# Altium footprint library WR-PHD_Pin Header_2.00mm.PcbLib: 63 footprints (part 4 of 4)
Each footprint in its own frame and in the unit in brackets; x right, y up, seen from the top. Pads: shape width x height; smd on the part's side, far side on the other; paste and mask are expansions set on the pad; w line width, h text height; cw(c..) or ccw(c..) is an arc to the next point about the centre after c.
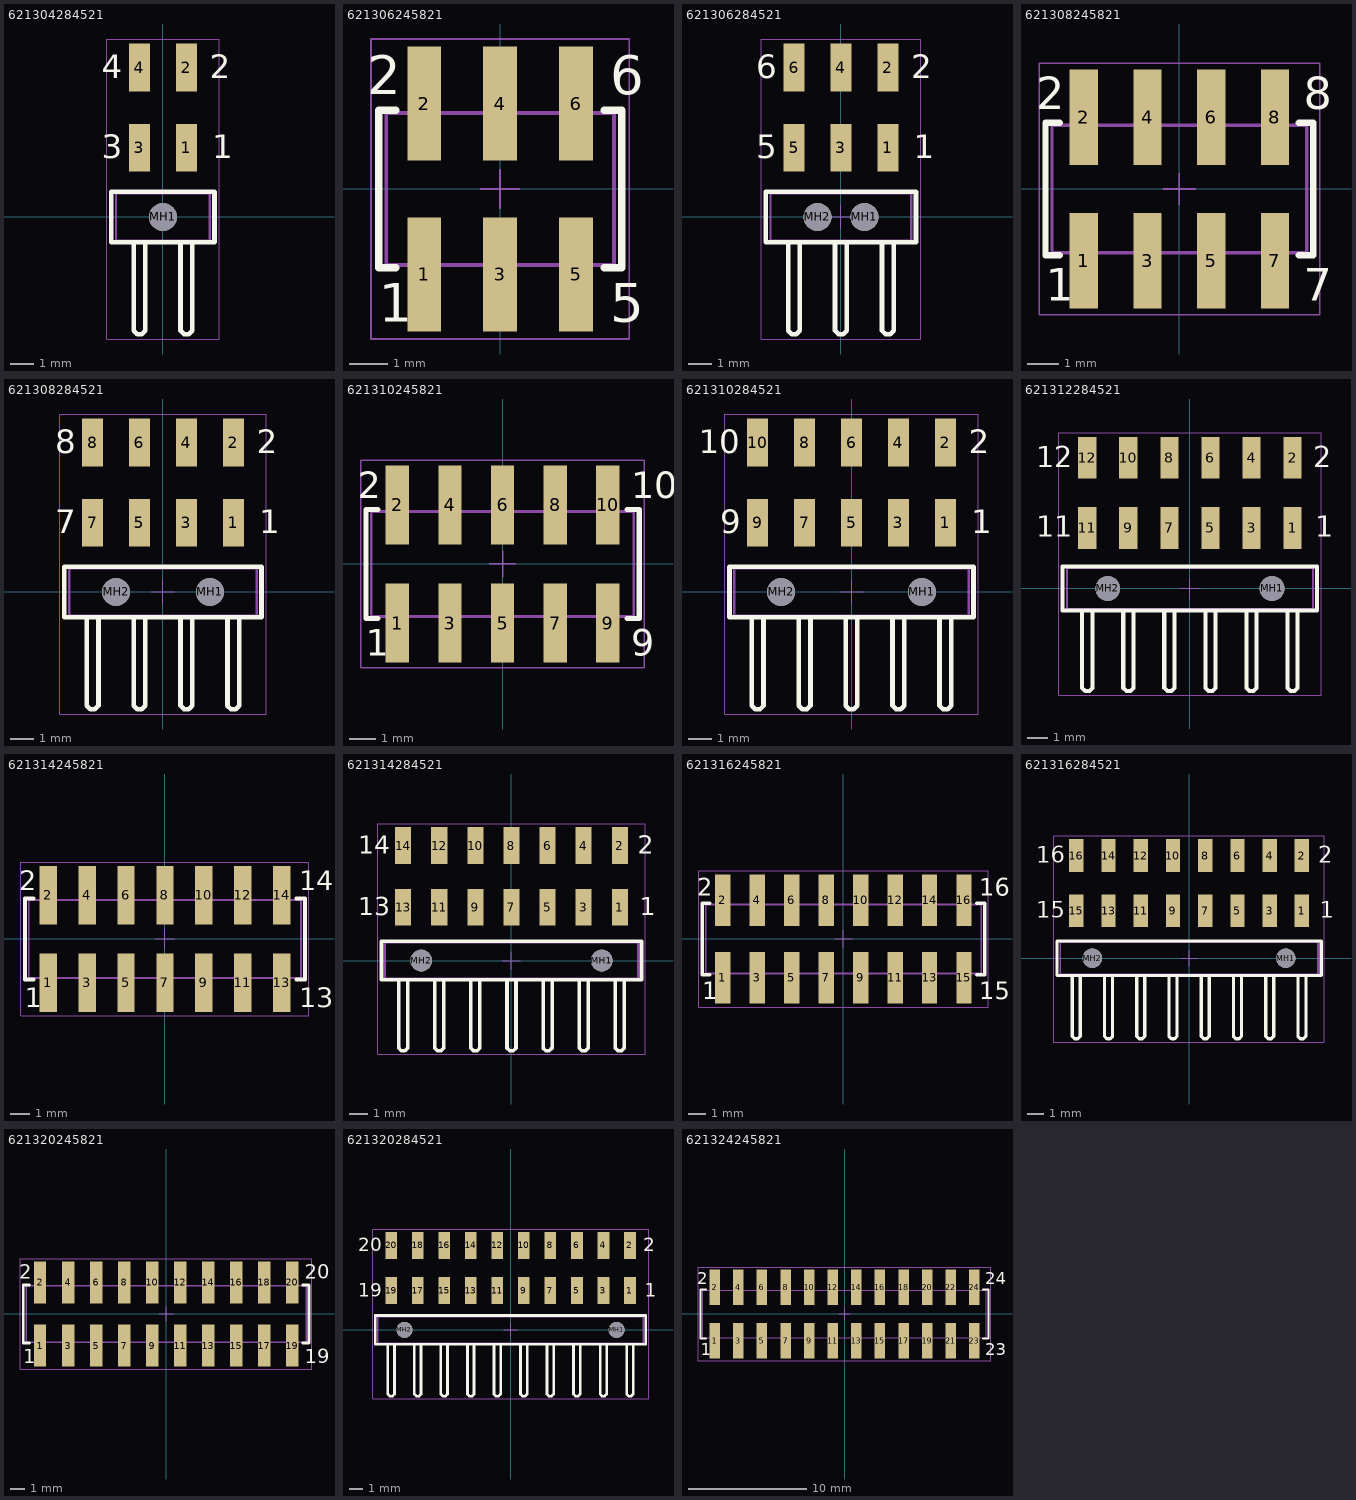
[diagram p3: the footprints below, top view; thin cyan lines are the x and y axes]

## 621304284521 [mm] "Pin Header, pitch 2.00 mm, SMD, Angled, dual row, 4p"
height 5.5
pads (5):
  rect 0.89x2.03 smd: 1(1,2.95) 2(1,6.37) 3(-1,2.95) 4(-1,6.37)
  round 1.2 hole 1.2 unplated: MH1(0,0)
Top Overlay:
  lines w0.2: -1.25,-1.075 -1.25,-4.5 -1.25,-4.75 -1.25,-4.85 -1.1,-5 -0.9,-5 -0.75,-4.85 -0.75,-4.75 -0.75,-4.5 -0.75,-1.075 ; 0.75,-1.075 0.75,-4.5 0.75,-4.75 0.75,-4.85 0.9,-5 1.1,-5 1.25,-4.85 1.25,-4.75 1.25,-4.5 1.25,-1.075 ; -2.2,-1.075 2.2,-1.075 2.2,1.075 -2.2,1.075 -2.2,-1.075
  text "4" at -2.6,5.91 h1.02
  text "2" at 2,5.91 h1.02
  text "3" at -2.6,2.51 h1.02
  text "1" at 2.1,2.51 h1.02
Mechanical 13:
  lines w0.1: -1.25,-1 -1.25,-4.5 -1.25,-4.75 -1.25,-4.85 -1.1,-5 -0.9,-5 -0.75,-4.85 -0.75,-4.75 -0.75,-4.5 -0.75,-1 ; 0.75,-1 0.75,-4.5 0.75,-4.75 0.75,-4.85 0.9,-5 1.1,-5 1.25,-4.85 1.25,-4.75 1.25,-4.5 1.25,-1 ; -2,-1 2,-1 2,1 -2,1 -2,-1
Mechanical 15:
  lines w0.05: -0.5,0 0.5,0 ; 0,-0.5 0,0.5 ; -2.4,-5.2 -2.4,7.585 2.4,7.585 2.4,-5.2 -2.4,-5.2
3D body "621304284521.stp": height 4.02, standoff -0.98, extent -2,-5 2,7.22

## 621306245821 [mm] "2.00 mm SMT Dual Pin Header Low Profile (Reel), 6p"
height 4.7
pads (6):
  rect 0.89x3 smd: 1(-2,-2.25) 2(-2,2.25) 3(0,-2.25) 4(0,2.25) 5(2,-2.25) 6(2,2.25)
Top Overlay:
  lines w0.2: -2.75,-2.075 -3.2,-2.075 -3.2,2.075 -2.75,2.075 ; 2.75,-2.075 3.2,-2.075 3.2,2.075 2.75,2.075
  text "6" at 2.9,2.5 h1.02
  text "5" at 2.9,-3.5 h1.02
  text "2" at -3.5,2.5 h1.02
  text "1" at -3.2,-3.5 h1.02
Mechanical 13:
  lines w0.1: -2.25,-2 -2.25,-3.1 -1.75,-3.1 -1.75,-2 ; -2.25,2 -2.25,3.1 -1.75,3.1 -1.75,2 ; -0.25,-2 -0.25,-3.1 0.25,-3.1 0.25,-2 ; -0.25,2 -0.25,3.1 0.25,3.1 0.25,2 ; 1.75,-2 1.75,-3.1 2.25,-3.1 2.25,-2 ; 1.75,2 1.75,3.1 2.25,3.1 2.25,2 ; -3,-2 -3,2 3,2 3,-2 -3,-2
Mechanical 15:
  lines w0.05: -0.5,0 0.5,0 ; 0,-0.5 0,0.5 ; -3.4,-3.95 -3.4,3.95 3.4,3.95 3.4,-3.95 -3.4,-3.95
3D body "621306245821.stp": height 4.7, standoff 0, extent -3,-3.1 3,3.1

## 621306284521 [mm] "Pin Header, pitch 2.00 mm, SMD, Angled, dual row, 6p"
height 5.5
pads (8):
  rect 0.89x2.03 smd: 1(2,2.95) 2(2,6.37) 3(0,2.95) 4(0,6.37) 5(-2,2.95) 6(-2,6.37)
  round 1.2 hole 1.2 unplated: MH1(1,0) MH2(-1,0)
Top Overlay:
  lines w0.2: -2.25,-1.075 -2.25,-4.5 -2.25,-4.75 -2.25,-4.85 -2.1,-5 -1.9,-5 -1.75,-4.85 -1.75,-4.75 -1.75,-4.5 -1.75,-1.075 ; -0.25,-1.075 -0.25,-4.5 -0.25,-4.75 -0.25,-4.85 -0.1,-5 0.1,-5 0.25,-4.85 0.25,-4.75 0.25,-4.5 0.25,-1.075 ; 1.75,-1.075 1.75,-4.5 1.75,-4.75 1.75,-4.85 1.9,-5 2.1,-5 2.25,-4.85 2.25,-4.75 2.25,-4.5 2.25,-1.075 ; -3.2,-1.075 3.2,-1.075 3.2,1.075 -3.2,1.075 -3.2,-1.075
  text "2" at 3,5.91 h1.02
  text "1" at 3.1,2.51 h1.02
  text "6" at -3.6,5.91 h1.02
  text "5" at -3.6,2.51 h1.02
Mechanical 13:
  lines w0.1: -2.25,-1 -2.25,-4.5 -2.25,-4.75 -2.25,-4.85 -2.1,-5 -1.9,-5 -1.75,-4.85 -1.75,-4.75 -1.75,-4.5 -1.75,-1 ; -0.25,-1 -0.25,-4.5 -0.25,-4.75 -0.25,-4.85 -0.1,-5 0.1,-5 0.25,-4.85 0.25,-4.75 0.25,-4.5 0.25,-1 ; 1.75,-1 1.75,-4.5 1.75,-4.75 1.75,-4.85 1.9,-5 2.1,-5 2.25,-4.85 2.25,-4.75 2.25,-4.5 2.25,-1 ; -3,-1 3,-1 3,1 -3,1 -3,-1
Mechanical 15:
  lines w0.05: -0.5,0 0.5,0 ; 0,-0.5 0,0.5 ; -3.4,-5.2 -3.4,7.585 3.4,7.585 3.4,-5.2 -3.4,-5.2
3D body "621306284521.stp": height 4.02, standoff -0.98, extent -3,-5 3,7.22

## 621308245821 [mm] "2.00 mm SMT Dual Pin Header Low Profile (Reel), 8p"
height 4.7
pads (8):
  rect 0.89x3 smd: 1(-3,-2.25) 2(-3,2.25) 3(-1,-2.25) 4(-1,2.25) 5(1,-2.25) 6(1,2.25) 7(3,-2.25) 8(3,2.25)
Top Overlay:
  lines w0.2: -3.75,-2.075 -4.2,-2.075 -4.2,2.075 -3.75,2.075 ; 3.75,-2.075 4.2,-2.075 4.2,2.075 3.75,2.075
  text "1" at -4.2,-3.5 h1.02
  text "2" at -4.5,2.5 h1.02
  text "7" at 3.9,-3.5 h1.02
  text "8" at 3.9,2.5 h1.02
Mechanical 13:
  lines w0.1: -3.25,-2 -3.25,-3.1 -2.75,-3.1 -2.75,-2 ; -3.25,2 -3.25,3.1 -2.75,3.1 -2.75,2 ; -1.25,-2 -1.25,-3.1 -0.75,-3.1 -0.75,-2 ; -1.25,2 -1.25,3.1 -0.75,3.1 -0.75,2 ; 0.75,-2 0.75,-3.1 1.25,-3.1 1.25,-2 ; 0.75,2 0.75,3.1 1.25,3.1 1.25,2 ; 2.75,-2 2.75,-3.1 3.25,-3.1 3.25,-2 ; 2.75,2 2.75,3.1 3.25,3.1 3.25,2 ; -4,-2 4,-2 4,2 -4,2 -4,-2
Mechanical 15:
  lines w0.05: -0.5,0 0.5,0 ; 0,-0.5 0,0.5 ; -4.4,-3.95 4.4,-3.95 4.4,3.95 -4.4,3.95 -4.4,-3.95
3D body "621308245821.stp": height 4.7, standoff 0, extent -4,-3.1 4,3.1

## 621308284521 [mm] "Pin Header, pitch 2.00 mm, SMD, Angled, dual row, 8p"
height 5.5
pads (10):
  rect 0.89x2.03 smd: 1(3,2.95) 2(3,6.37) 3(1,2.95) 4(1,6.37) 5(-1,2.95) 6(-1,6.37) 7(-3,2.95) 8(-3,6.37)
  round 1.2 hole 1.2 unplated: MH1(2,0) MH2(-2,0)
Top Overlay:
  lines w0.2: -3.25,-1.075 -3.25,-4.5 -3.25,-4.75 -3.25,-4.85 -3.1,-5 -2.9,-5 -2.75,-4.85 -2.75,-4.75 -2.75,-4.5 -2.75,-1.075 ; -1.25,-1.075 -1.25,-4.5 -1.25,-4.75 -1.25,-4.85 -1.1,-5 -0.9,-5 -0.75,-4.85 -0.75,-4.75 -0.75,-4.5 -0.75,-1.075 ; 0.75,-1.075 0.75,-4.5 0.75,-4.75 0.75,-4.85 0.9,-5 1.1,-5 1.25,-4.85 1.25,-4.75 1.25,-4.5 1.25,-1.075 ; 2.75,-1.075 2.75,-4.5 2.75,-4.75 2.75,-4.85 2.9,-5 3.1,-5 3.25,-4.85 3.25,-4.75 3.25,-4.5 3.25,-1.075 ; -4.2,-1.075 -4.2,1.075 4.2,1.075 4.2,-1.075 -4.2,-1.075
  text "1" at 4.1,2.51 h1.02
  text "2" at 4,5.91 h1.02
  text "8" at -4.6,5.91 h1.02
  text "7" at -4.6,2.51 h1.02
Mechanical 13:
  lines w0.1: -3.25,-1 -3.25,-4.5 -3.25,-4.75 -3.25,-4.85 -3.1,-5 -2.9,-5 -2.75,-4.85 -2.75,-4.75 -2.75,-4.5 -2.75,-1 ; -1.25,-1 -1.25,-4.5 -1.25,-4.75 -1.25,-4.85 -1.1,-5 -0.9,-5 -0.75,-4.85 -0.75,-4.75 -0.75,-4.5 -0.75,-1 ; 0.75,-1 0.75,-4.5 0.75,-4.75 0.75,-4.85 0.9,-5 1.1,-5 1.25,-4.85 1.25,-4.75 1.25,-4.5 1.25,-1 ; 2.75,-1 2.75,-4.5 2.75,-4.75 2.75,-4.85 2.9,-5 3.1,-5 3.25,-4.85 3.25,-4.75 3.25,-4.5 3.25,-1 ; -4,-1 -4,1 4,1 4,-1 -4,-1
Mechanical 15:
  lines w0.05: -0.5,0 0.5,0 ; 0,-0.5 0,0.5 ; -4.4,-5.2 4.4,-5.2 4.4,7.585 -4.4,7.585 -4.4,-5.2
3D body "621308284521.stp": height 4.02, standoff -0.98, extent -4,-5 4,7.22

## 621310245821 [mm] "2.00 mm SMT Dual Pin Header Low Profile (Reel), 10p"
height 4.7
pads (10):
  rect 0.89x3 smd: 1(-4,-2.25) 2(-4,2.25) 3(-2,-2.25) 4(-2,2.25) 5(0,-2.25) 6(0,2.25) 7(2,-2.25) 8(2,2.25) 9(4,-2.25) 10(4,2.25)
Top Overlay:
  lines w0.2: -4.75,-2.075 -5.2,-2.075 -5.2,2.075 -4.75,2.075 ; 4.75,-2.075 5.2,-2.075 5.2,2.075 4.75,2.075
  text "2" at -5.5,2.5 h1.02
  text "1" at -5.2,-3.5 h1.02
  text "9" at 4.9,-3.5 h1.02
  text "10" at 4.9,2.5 h1.02
Mechanical 13:
  lines w0.1: -4.25,-2 -4.25,-3.1 -3.75,-3.1 -3.75,-2 ; -4.25,2 -4.25,3.1 -3.75,3.1 -3.75,2 ; -2.25,-2 -2.25,-3.1 -1.75,-3.1 -1.75,-2 ; -2.25,2 -2.25,3.1 -1.75,3.1 -1.75,2 ; -0.25,-2 -0.25,-3.1 0.25,-3.1 0.25,-2 ; -0.25,2 -0.25,3.1 0.25,3.1 0.25,2 ; 1.75,-2 1.75,-3.1 2.25,-3.1 2.25,-2 ; 1.75,2 1.75,3.1 2.25,3.1 2.25,2 ; 3.75,-2 3.75,-3.1 4.25,-3.1 4.25,-2 ; 3.75,2 3.75,3.1 4.25,3.1 4.25,2 ; -5,-2 -5,2 5,2 5,-2 -5,-2
Mechanical 15:
  lines w0.05: -0.5,0 0.5,0 ; 0,-0.5 0,0.5 ; -5.4,-3.95 -5.4,3.95 5.4,3.95 5.4,-3.95 -5.4,-3.95
3D body "621310245821.stp": height 4.7, standoff 0, extent -5,-3.1 5,3.1

## 621310284521 [mm] "Pin Header, pitch 2.00 mm, SMD, Angled, dual row, 10p"
height 5.5
pads (12):
  rect 0.89x2.03 smd: 1(4,2.95) 2(4,6.37) 3(2,2.95) 4(2,6.37) 5(0,2.95) 6(0,6.37) 7(-2,2.95) 8(-2,6.37) 9(-4,2.95) 10(-4,6.37)
  round 1.2 hole 1.2 unplated: MH1(3,0) MH2(-3,0)
Top Overlay:
  lines w0.2: -4.25,-1.075 -4.25,-4.5 -4.25,-4.75 -4.25,-4.85 -4.1,-5 -3.9,-5 -3.75,-4.85 -3.75,-4.75 -3.75,-4.5 -3.75,-1.075 ; -2.25,-1.075 -2.25,-4.5 -2.25,-4.75 -2.25,-4.85 -2.1,-5 -1.9,-5 -1.75,-4.85 -1.75,-4.75 -1.75,-4.5 -1.75,-1.075 ; -0.25,-1.075 -0.25,-4.5 -0.25,-4.75 -0.25,-4.85 -0.1,-5 0.1,-5 0.25,-4.85 0.25,-4.75 0.25,-4.5 0.25,-1.075 ; 1.75,-1.075 1.75,-4.5 1.75,-4.75 1.75,-4.85 1.9,-5 2.1,-5 2.25,-4.85 2.25,-4.75 2.25,-4.5 2.25,-1.075 ; 3.75,-1.075 3.75,-4.5 3.75,-4.75 3.75,-4.85 3.9,-5 4.1,-5 4.25,-4.85 4.25,-4.75 4.25,-4.5 4.25,-1.075 ; -5.2,-1.075 -5.2,1.075 5.2,1.075 5.2,-1.075 -5.2,-1.075
  text "1" at 5.1,2.51 h1.02
  text "2" at 5,5.91 h1.02
  text "10" at -6.5,5.91 h1.02
  text "9" at -5.6,2.51 h1.02
Mechanical 13:
  lines w0.1: -4.25,-1 -4.25,-4.5 -4.25,-4.75 -4.25,-4.85 -4.1,-5 -3.9,-5 -3.75,-4.85 -3.75,-4.75 -3.75,-4.5 -3.75,-1 ; -2.25,-1 -2.25,-4.5 -2.25,-4.75 -2.25,-4.85 -2.1,-5 -1.9,-5 -1.75,-4.85 -1.75,-4.75 -1.75,-4.5 -1.75,-1 ; -0.25,-1 -0.25,-4.5 -0.25,-4.75 -0.25,-4.85 -0.1,-5 0.1,-5 0.25,-4.85 0.25,-4.75 0.25,-4.5 0.25,-1 ; 1.75,-1 1.75,-4.5 1.75,-4.75 1.75,-4.85 1.9,-5 2.1,-5 2.25,-4.85 2.25,-4.75 2.25,-4.5 2.25,-1 ; 3.75,-1 3.75,-4.5 3.75,-4.75 3.75,-4.85 3.9,-5 4.1,-5 4.25,-4.85 4.25,-4.75 4.25,-4.5 4.25,-1 ; -5,-1 -5,1 5,1 5,-1 -5,-1
Mechanical 15:
  lines w0.05: -0.5,0 0.5,0 ; 0,-0.5 0,0.5 ; -5.4,-5.2 5.4,-5.2 5.4,7.585 -5.4,7.585 -5.4,-5.2
3D body "621310284521.stp": height 4.02, standoff -0.98, extent -5,-5 5,7.22

## 621312284521 [mm] "Pin Header, pitch 2.00 mm, SMD, Angled, dual row, 12p"
height 5.5
pads (14):
  rect 0.89x2.03 smd: 1(5,2.95) 2(5,6.37) 3(3,2.95) 4(3,6.37) 5(1,2.95) 6(1,6.37) 7(-1,2.95) 8(-1,6.37) 9(-3,2.95) 10(-3,6.37) 11(-5,2.95) 12(-5,6.37)
  round 1.2 hole 1.2 unplated: MH1(4,0) MH2(-4,0)
Top Overlay:
  lines w0.2: -5.25,-1.075 -5.25,-4.5 -5.25,-4.75 -5.25,-4.85 -5.1,-5 -4.9,-5 -4.75,-4.85 -4.75,-4.75 -4.75,-4.5 -4.75,-1.075 ; -3.25,-1.075 -3.25,-4.5 -3.25,-4.75 -3.25,-4.85 -3.1,-5 -2.9,-5 -2.75,-4.85 -2.75,-4.75 -2.75,-4.5 -2.75,-1.075 ; -1.25,-1.075 -1.25,-4.5 -1.25,-4.75 -1.25,-4.85 -1.1,-5 -0.9,-5 -0.75,-4.85 -0.75,-4.75 -0.75,-4.5 -0.75,-1.075 ; 0.75,-1.075 0.75,-4.5 0.75,-4.75 0.75,-4.85 0.9,-5 1.1,-5 1.25,-4.85 1.25,-4.75 1.25,-4.5 1.25,-1.075 ; 2.75,-1.075 2.75,-4.5 2.75,-4.75 2.75,-4.85 2.9,-5 3.1,-5 3.25,-4.85 3.25,-4.75 3.25,-4.5 3.25,-1.075 ; 4.75,-1.075 4.75,-4.5 4.75,-4.75 4.75,-4.85 4.9,-5 5.1,-5 5.25,-4.85 5.25,-4.75 5.25,-4.5 5.25,-1.075 ; -6.2,-1.075 6.2,-1.075 6.2,1.075 -6.2,1.075 -6.2,-1.075
  text "12" at -7.5,5.91 h1.02
  text "11" at -7.5,2.51 h1.02
  text "2" at 6,5.91 h1.02
  text "1" at 6.1,2.51 h1.02
Mechanical 13:
  lines w0.1: -5.25,-1 -5.25,-4.5 -5.25,-4.75 -5.25,-4.85 -5.1,-5 -4.9,-5 -4.75,-4.85 -4.75,-4.75 -4.75,-4.5 -4.75,-1 ; -3.25,-1 -3.25,-4.5 -3.25,-4.75 -3.25,-4.85 -3.1,-5 -2.9,-5 -2.75,-4.85 -2.75,-4.75 -2.75,-4.5 -2.75,-1 ; -1.25,-1 -1.25,-4.5 -1.25,-4.75 -1.25,-4.85 -1.1,-5 -0.9,-5 -0.75,-4.85 -0.75,-4.75 -0.75,-4.5 -0.75,-1 ; 0.75,-1 0.75,-4.5 0.75,-4.75 0.75,-4.85 0.9,-5 1.1,-5 1.25,-4.85 1.25,-4.75 1.25,-4.5 1.25,-1 ; 2.75,-1 2.75,-4.5 2.75,-4.75 2.75,-4.85 2.9,-5 3.1,-5 3.25,-4.85 3.25,-4.75 3.25,-4.5 3.25,-1 ; 4.75,-1 4.75,-4.5 4.75,-4.75 4.75,-4.85 4.9,-5 5.1,-5 5.25,-4.85 5.25,-4.75 5.25,-4.5 5.25,-1 ; -6,-1 6,-1 6,1 -6,1 -6,-1
Mechanical 15:
  lines w0.05: -0.5,0 0.5,0 ; 0,-0.5 0,0.5 ; -6.4,-5.2 -6.4,7.585 6.4,7.585 6.4,-5.2 -6.4,-5.2
3D body "621312284521.stp": height 4.02, standoff -0.98, extent -6,-5 6,7.22

## 621314245821 [mm] "2.00 mm SMT Dual Pin Header Low Profile (Reel), 14p"
height 4.7
pads (14):
  rect 0.89x3 smd: 1(-6,-2.25) 2(-6,2.25) 3(-4,-2.25) 4(-4,2.25) 5(-2,-2.25) 6(-2,2.25) 7(0,-2.25) 8(0,2.25) 9(2,-2.25) 10(2,2.25) 11(4,-2.25) 12(4,2.25) 13(6,-2.25) 14(6,2.25)
Top Overlay:
  lines w0.2: -6.75,-2.075 -7.2,-2.075 -7.2,2.075 -6.75,2.075 ; 6.75,-2.075 7.2,-2.075 7.2,2.075 6.75,2.075
  text "1" at -7.2,-3.5 h1.02
  text "2" at -7.5,2.5 h1.02
  text "13" at 6.9,-3.5 h1.02
  text "14" at 6.9,2.5 h1.02
Mechanical 13:
  lines w0.1: -6.25,-2 -6.25,-3.1 -5.75,-3.1 -5.75,-2 ; -6.25,2 -6.25,3.1 -5.75,3.1 -5.75,2 ; -4.25,-2 -4.25,-3.1 -3.75,-3.1 -3.75,-2 ; -4.25,2 -4.25,3.1 -3.75,3.1 -3.75,2 ; -2.25,-2 -2.25,-3.1 -1.75,-3.1 -1.75,-2 ; -2.25,2 -2.25,3.1 -1.75,3.1 -1.75,2 ; -0.25,-2 -0.25,-3.1 0.25,-3.1 0.25,-2 ; -0.25,2 -0.25,3.1 0.25,3.1 0.25,2 ; 1.75,-2 1.75,-3.1 2.25,-3.1 2.25,-2 ; 1.75,2 1.75,3.1 2.25,3.1 2.25,2 ; 3.75,-2 3.75,-3.1 4.25,-3.1 4.25,-2 ; 3.75,2 3.75,3.1 4.25,3.1 4.25,2 ; 5.75,-2 5.75,-3.1 6.25,-3.1 6.25,-2 ; 5.75,2 5.75,3.1 6.25,3.1 6.25,2 ; -7,-2 7,-2 7,2 -7,2 -7,-2
Mechanical 15:
  lines w0.05: -0.5,0 0.5,0 ; 0,-0.5 0,0.5 ; -7.4,-3.95 7.4,-3.95 7.4,3.95 -7.4,3.95 -7.4,-3.95
3D body "621314245821.stp": height 4.7, standoff 0, extent -7,-3.1 7,3.1

## 621314284521 [mm] "Pin Header, pitch 2.00 mm, SMD, Angled, dual row, 14p"
height 5.5
pads (16):
  rect 0.89x2.03 smd: 1(6,2.95) 2(6,6.37) 3(4,2.95) 4(4,6.37) 5(2,2.95) 6(2,6.37) 7(0,2.95) 8(0,6.37) 9(-2,2.95) 10(-2,6.37) 11(-4,2.95) 12(-4,6.37) 13(-6,2.95) 14(-6,6.37)
  round 1.2 hole 1.2 unplated: MH1(5,0) MH2(-5,0)
Top Overlay:
  lines w0.2: -6.25,-1.075 -6.25,-4.5 -6.25,-4.75 -6.25,-4.85 -6.1,-5 -5.9,-5 -5.75,-4.85 -5.75,-4.75 -5.75,-4.5 -5.75,-1.075 ; -4.25,-1.075 -4.25,-4.5 -4.25,-4.75 -4.25,-4.85 -4.1,-5 -3.9,-5 -3.75,-4.85 -3.75,-4.75 -3.75,-4.5 -3.75,-1.075 ; -2.25,-1.075 -2.25,-4.5 -2.25,-4.75 -2.25,-4.85 -2.1,-5 -1.9,-5 -1.75,-4.85 -1.75,-4.75 -1.75,-4.5 -1.75,-1.075 ; -0.25,-1.075 -0.25,-4.5 -0.25,-4.75 -0.25,-4.85 -0.1,-5 0.1,-5 0.25,-4.85 0.25,-4.75 0.25,-4.5 0.25,-1.075 ; 1.75,-1.075 1.75,-4.5 1.75,-4.75 1.75,-4.85 1.9,-5 2.1,-5 2.25,-4.85 2.25,-4.75 2.25,-4.5 2.25,-1.075 ; 3.75,-1.075 3.75,-4.5 3.75,-4.75 3.75,-4.85 3.9,-5 4.1,-5 4.25,-4.85 4.25,-4.75 4.25,-4.5 4.25,-1.075 ; 5.75,-1.075 5.75,-4.5 5.75,-4.75 5.75,-4.85 5.9,-5 6.1,-5 6.25,-4.85 6.25,-4.75 6.25,-4.5 6.25,-1.075 ; -7.2,-1.075 -7.2,1.075 7.2,1.075 7.2,-1.075 -7.2,-1.075
  text "13" at -8.5,2.51 h1.02
  text "14" at -8.5,5.91 h1.02
  text "1" at 7.1,2.51 h1.02
  text "2" at 7,5.91 h1.02
Mechanical 13:
  lines w0.1: -6.25,-1 -6.25,-4.5 -6.25,-4.75 -6.25,-4.85 -6.1,-5 -5.9,-5 -5.75,-4.85 -5.75,-4.75 -5.75,-4.5 -5.75,-1 ; -4.25,-1 -4.25,-4.5 -4.25,-4.75 -4.25,-4.85 -4.1,-5 -3.9,-5 -3.75,-4.85 -3.75,-4.75 -3.75,-4.5 -3.75,-1 ; -2.25,-1 -2.25,-4.5 -2.25,-4.75 -2.25,-4.85 -2.1,-5 -1.9,-5 -1.75,-4.85 -1.75,-4.75 -1.75,-4.5 -1.75,-1 ; -0.25,-1 -0.25,-4.5 -0.25,-4.75 -0.25,-4.85 -0.1,-5 0.1,-5 0.25,-4.85 0.25,-4.75 0.25,-4.5 0.25,-1 ; 1.75,-1 1.75,-4.5 1.75,-4.75 1.75,-4.85 1.9,-5 2.1,-5 2.25,-4.85 2.25,-4.75 2.25,-4.5 2.25,-1 ; 3.75,-1 3.75,-4.5 3.75,-4.75 3.75,-4.85 3.9,-5 4.1,-5 4.25,-4.85 4.25,-4.75 4.25,-4.5 4.25,-1 ; 5.75,-1 5.75,-4.5 5.75,-4.75 5.75,-4.85 5.9,-5 6.1,-5 6.25,-4.85 6.25,-4.75 6.25,-4.5 6.25,-1 ; -7,-1 -7,1 7,1 7,-1 -7,-1
Mechanical 15:
  lines w0.05: -0.5,0 0.5,0 ; 0,-0.5 0,0.5 ; -7.4,-5.2 7.4,-5.2 7.4,7.585 -7.4,7.585 -7.4,-5.2
3D body "621314284521.stp": height 4.02, standoff -0.98, extent -7,-5 7,7.22

## 621316245821 [mm] "2.00 mm SMT Dual Pin Header Low Profile (Reel), 16p"
height 4.7
pads (16):
  rect 0.89x3 smd: 1(-7,-2.25) 2(-7,2.25) 3(-5,-2.25) 4(-5,2.25) 5(-3,-2.25) 6(-3,2.25) 7(-1,-2.25) 8(-1,2.25) 9(1,-2.25) 10(1,2.25) 11(3,-2.25) 12(3,2.25) 13(5,-2.25) 14(5,2.25) 15(7,-2.25) 16(7,2.25)
Top Overlay:
  lines w0.2: -7.75,-2.075 -8.2,-2.075 -8.2,2.075 -7.75,2.075 ; 7.75,-2.075 8.2,-2.075 8.2,2.075 7.75,2.075
  text "16" at 7.9,2.5 h1.02
  text "15" at 7.9,-3.5 h1.02
  text "2" at -8.5,2.5 h1.02
  text "1" at -8.2,-3.5 h1.02
Mechanical 13:
  lines w0.1: -7.25,-2 -7.25,-3.1 -6.75,-3.1 -6.75,-2 ; -7.25,2 -7.25,3.1 -6.75,3.1 -6.75,2 ; -5.25,-2 -5.25,-3.1 -4.75,-3.1 -4.75,-2 ; -5.25,2 -5.25,3.1 -4.75,3.1 -4.75,2 ; -3.25,-2 -3.25,-3.1 -2.75,-3.1 -2.75,-2 ; -3.25,2 -3.25,3.1 -2.75,3.1 -2.75,2 ; -1.25,-2 -1.25,-3.1 -0.75,-3.1 -0.75,-2 ; -1.25,2 -1.25,3.1 -0.75,3.1 -0.75,2 ; 0.75,-2 0.75,-3.1 1.25,-3.1 1.25,-2 ; 0.75,2 0.75,3.1 1.25,3.1 1.25,2 ; 2.75,-2 2.75,-3.1 3.25,-3.1 3.25,-2 ; 2.75,2 2.75,3.1 3.25,3.1 3.25,2 ; 4.75,-2 4.75,-3.1 5.25,-3.1 5.25,-2 ; 4.75,2 4.75,3.1 5.25,3.1 5.25,2 ; 6.75,-2 6.75,-3.1 7.25,-3.1 7.25,-2 ; 6.75,2 6.75,3.1 7.25,3.1 7.25,2 ; -8,-2 -8,2 8,2 8,-2 -8,-2
Mechanical 15:
  lines w0.05: -0.5,0 0.5,0 ; 0,-0.5 0,0.5 ; -8.4,-3.95 -8.4,3.95 8.4,3.95 8.4,-3.95 -8.4,-3.95
3D body "621316245821.stp": height 4.7, standoff 0, extent -8,-3.1 8,3.1

## 621316284521 [mm] "Pin Header, pitch 2.00 mm, SMD, Angled, dual row, 16p"
height 5.5
pads (18):
  rect 0.89x2.03 smd: 1(7,2.95) 2(7,6.37) 3(5,2.95) 4(5,6.37) 5(3,2.95) 6(3,6.37) 7(1,2.95) 8(1,6.37) 9(-1,2.95) 10(-1,6.37) 11(-3,2.95) 12(-3,6.37) 13(-5,2.95) 14(-5,6.37) 15(-7,2.95) 16(-7,6.37)
  round 1.2 hole 1.2 unplated: MH1(6,0) MH2(-6,0)
Top Overlay:
  lines w0.2: -7.25,-1.075 -7.25,-4.5 -7.25,-4.75 -7.25,-4.85 -7.1,-5 -6.9,-5 -6.75,-4.85 -6.75,-4.75 -6.75,-4.5 -6.75,-1.075 ; -5.25,-1.075 -5.25,-4.5 -5.25,-4.75 -5.25,-4.85 -5.1,-5 -4.9,-5 -4.75,-4.85 -4.75,-4.75 -4.75,-4.5 -4.75,-1.075 ; -3.25,-1.075 -3.25,-4.5 -3.25,-4.75 -3.25,-4.85 -3.1,-5 -2.9,-5 -2.75,-4.85 -2.75,-4.75 -2.75,-4.5 -2.75,-1.075 ; -1.25,-1.075 -1.25,-4.5 -1.25,-4.75 -1.25,-4.85 -1.1,-5 -0.9,-5 -0.75,-4.85 -0.75,-4.75 -0.75,-4.5 -0.75,-1.075 ; 0.75,-1.075 0.75,-4.5 0.75,-4.75 0.75,-4.85 0.9,-5 1.1,-5 1.25,-4.85 1.25,-4.75 1.25,-4.5 1.25,-1.075 ; 2.75,-1.075 2.75,-4.5 2.75,-4.75 2.75,-4.85 2.9,-5 3.1,-5 3.25,-4.85 3.25,-4.75 3.25,-4.5 3.25,-1.075 ; 4.75,-1.075 4.75,-4.5 4.75,-4.75 4.75,-4.85 4.9,-5 5.1,-5 5.25,-4.85 5.25,-4.75 5.25,-4.5 5.25,-1.075 ; 6.75,-1.075 6.75,-4.5 6.75,-4.75 6.75,-4.85 6.9,-5 7.1,-5 7.25,-4.85 7.25,-4.75 7.25,-4.5 7.25,-1.075 ; -8.2,-1.075 8.2,-1.075 8.2,1.075 -8.2,1.075 -8.2,-1.075
  text "2" at 8,5.91 h1.02
  text "1" at 8.1,2.51 h1.02
  text "16" at -9.5,5.91 h1.02
  text "15" at -9.5,2.51 h1.02
Mechanical 13:
  lines w0.1: -7.25,-1 -7.25,-4.5 -7.25,-4.75 -7.25,-4.85 -7.1,-5 -6.9,-5 -6.75,-4.85 -6.75,-4.75 -6.75,-4.5 -6.75,-1 ; -5.25,-1 -5.25,-4.5 -5.25,-4.75 -5.25,-4.85 -5.1,-5 -4.9,-5 -4.75,-4.85 -4.75,-4.75 -4.75,-4.5 -4.75,-1 ; -3.25,-1 -3.25,-4.5 -3.25,-4.75 -3.25,-4.85 -3.1,-5 -2.9,-5 -2.75,-4.85 -2.75,-4.75 -2.75,-4.5 -2.75,-1 ; -1.25,-1 -1.25,-4.5 -1.25,-4.75 -1.25,-4.85 -1.1,-5 -0.9,-5 -0.75,-4.85 -0.75,-4.75 -0.75,-4.5 -0.75,-1 ; 0.75,-1 0.75,-4.5 0.75,-4.75 0.75,-4.85 0.9,-5 1.1,-5 1.25,-4.85 1.25,-4.75 1.25,-4.5 1.25,-1 ; 2.75,-1 2.75,-4.5 2.75,-4.75 2.75,-4.85 2.9,-5 3.1,-5 3.25,-4.85 3.25,-4.75 3.25,-4.5 3.25,-1 ; 4.75,-1 4.75,-4.5 4.75,-4.75 4.75,-4.85 4.9,-5 5.1,-5 5.25,-4.85 5.25,-4.75 5.25,-4.5 5.25,-1 ; 6.75,-1 6.75,-4.5 6.75,-4.75 6.75,-4.85 6.9,-5 7.1,-5 7.25,-4.85 7.25,-4.75 7.25,-4.5 7.25,-1 ; -8,-1 8,-1 8,1 -8,1 -8,-1
Mechanical 15:
  lines w0.05: -0.5,0 0.5,0 ; 0,-0.5 0,0.5 ; -8.4,-5.2 -8.4,7.585 8.4,7.585 8.4,-5.2 -8.4,-5.2
3D body "621316284521.stp": height 4.02, standoff -0.98, extent -8,-5 8,7.22

## 621320245821 [mm] "2.00 mm SMT Dual Pin Header Low Profile (Reel), 20p"
height 4.7
pads (20):
  rect 0.89x3 smd: 1(-9,-2.25) 2(-9,2.25) 3(-7,-2.25) 4(-7,2.25) 5(-5,-2.25) 6(-5,2.25) 7(-3,-2.25) 8(-3,2.25) 9(-1,-2.25) 10(-1,2.25) 11(1,-2.25) 12(1,2.25) 13(3,-2.25) 14(3,2.25) 15(5,-2.25) 16(5,2.25) 17(7,-2.25) 18(7,2.25) 19(9,-2.25) 20(9,2.25)
Top Overlay:
  lines w0.2: -9.75,-2.075 -10.2,-2.075 -10.2,2.075 -9.75,2.075 ; 9.75,-2.075 10.2,-2.075 10.2,2.075 9.75,2.075
  text "1" at -10.2,-3.5 h1.02
  text "2" at -10.5,2.5 h1.02
  text "19" at 9.9,-3.5 h1.02
  text "20" at 9.9,2.5 h1.02
Mechanical 13:
  lines w0.1: -9.25,-2 -9.25,-3.1 -8.75,-3.1 -8.75,-2 ; -9.25,2 -9.25,3.1 -8.75,3.1 -8.75,2 ; -7.25,-2 -7.25,-3.1 -6.75,-3.1 -6.75,-2 ; -7.25,2 -7.25,3.1 -6.75,3.1 -6.75,2 ; -5.25,-2 -5.25,-3.1 -4.75,-3.1 -4.75,-2 ; -5.25,2 -5.25,3.1 -4.75,3.1 -4.75,2 ; -3.25,-2 -3.25,-3.1 -2.75,-3.1 -2.75,-2 ; -3.25,2 -3.25,3.1 -2.75,3.1 -2.75,2 ; -1.25,-2 -1.25,-3.1 -0.75,-3.1 -0.75,-2 ; -1.25,2 -1.25,3.1 -0.75,3.1 -0.75,2 ; 0.75,-2 0.75,-3.1 1.25,-3.1 1.25,-2 ; 0.75,2 0.75,3.1 1.25,3.1 1.25,2 ; 2.75,-2 2.75,-3.1 3.25,-3.1 3.25,-2 ; 2.75,2 2.75,3.1 3.25,3.1 3.25,2 ; 4.75,-2 4.75,-3.1 5.25,-3.1 5.25,-2 ; 4.75,2 4.75,3.1 5.25,3.1 5.25,2 ; 6.75,-2 6.75,-3.1 7.25,-3.1 7.25,-2 ; 6.75,2 6.75,3.1 7.25,3.1 7.25,2 ; 8.75,-2 8.75,-3.1 9.25,-3.1 9.25,-2 ; 8.75,2 8.75,3.1 9.25,3.1 9.25,2 ; -10,-2 10,-2 10,2 -10,2 -10,-2
Mechanical 15:
  lines w0.05: -0.5,0 0.5,0 ; 0,-0.5 0,0.5 ; -10.4,-3.95 10.4,-3.95 10.4,3.95 -10.4,3.95 -10.4,-3.95
3D body "621320245821.stp": height 4.7, standoff 0, extent -10,-3.1 10,3.1

## 621320284521 [mm] "Pin Header, pitch 2.00 mm, SMD, Angled, dual row, 20p"
height 5.5
pads (22):
  rect 0.89x2.03 smd: 1(9,2.95) 2(9,6.37) 3(7,2.95) 4(7,6.37) 5(5,2.95) 6(5,6.37) 7(3,2.95) 8(3,6.37) 9(1,2.95) 10(1,6.37) 11(-1,2.95) 12(-1,6.37) 13(-3,2.95) 14(-3,6.37) 15(-5,2.95) 16(-5,6.37) 17(-7,2.95) 18(-7,6.37) 19(-9,2.95) 20(-9,6.37)
  round 1.2 hole 1.2 unplated: MH1(8,0) MH2(-8,0)
Top Overlay:
  lines w0.2: -9.25,-1.075 -9.25,-4.5 -9.25,-4.75 -9.25,-4.85 -9.1,-5 -8.9,-5 -8.75,-4.85 -8.75,-4.75 -8.75,-4.5 -8.75,-1.075 ; -7.25,-1.075 -7.25,-4.5 -7.25,-4.75 -7.25,-4.85 -7.1,-5 -6.9,-5 -6.75,-4.85 -6.75,-4.75 -6.75,-4.5 -6.75,-1.075 ; -5.25,-1.075 -5.25,-4.5 -5.25,-4.75 -5.25,-4.85 -5.1,-5 -4.9,-5 -4.75,-4.85 -4.75,-4.75 -4.75,-4.5 -4.75,-1.075 ; -3.25,-1.075 -3.25,-4.5 -3.25,-4.75 -3.25,-4.85 -3.1,-5 -2.9,-5 -2.75,-4.85 -2.75,-4.75 -2.75,-4.5 -2.75,-1.075 ; -1.25,-1.075 -1.25,-4.5 -1.25,-4.75 -1.25,-4.85 -1.1,-5 -0.9,-5 -0.75,-4.85 -0.75,-4.75 -0.75,-4.5 -0.75,-1.075 ; 0.75,-1.075 0.75,-4.5 0.75,-4.75 0.75,-4.85 0.9,-5 1.1,-5 1.25,-4.85 1.25,-4.75 1.25,-4.5 1.25,-1.075 ; 2.75,-1.075 2.75,-4.5 2.75,-4.75 2.75,-4.85 2.9,-5 3.1,-5 3.25,-4.85 3.25,-4.75 3.25,-4.5 3.25,-1.075 ; 4.75,-1.075 4.75,-4.5 4.75,-4.75 4.75,-4.85 4.9,-5 5.1,-5 5.25,-4.85 5.25,-4.75 5.25,-4.5 5.25,-1.075 ; 6.75,-1.075 6.75,-4.5 6.75,-4.75 6.75,-4.85 6.9,-5 7.1,-5 7.25,-4.85 7.25,-4.75 7.25,-4.5 7.25,-1.075 ; 8.75,-1.075 8.75,-4.5 8.75,-4.75 8.75,-4.85 8.9,-5 9.1,-5 9.25,-4.85 9.25,-4.75 9.25,-4.5 9.25,-1.075 ; -10.2,-1.075 10.2,-1.075 10.2,1.075 -10.2,1.075 -10.2,-1.075
  text "19" at -11.5,2.51 h1.02
  text "20" at -11.5,5.91 h1.02
  text "2" at 10,5.91 h1.02
  text "1" at 10.1,2.51 h1.02
Mechanical 13:
  lines w0.1: -9.25,-1 -9.25,-4.5 -9.25,-4.75 -9.25,-4.85 -9.1,-5 -8.9,-5 -8.75,-4.85 -8.75,-4.75 -8.75,-4.5 -8.75,-1 ; -7.25,-1 -7.25,-4.5 -7.25,-4.75 -7.25,-4.85 -7.1,-5 -6.9,-5 -6.75,-4.85 -6.75,-4.75 -6.75,-4.5 -6.75,-1 ; -5.25,-1 -5.25,-4.5 -5.25,-4.75 -5.25,-4.85 -5.1,-5 -4.9,-5 -4.75,-4.85 -4.75,-4.75 -4.75,-4.5 -4.75,-1 ; -3.25,-1 -3.25,-4.5 -3.25,-4.75 -3.25,-4.85 -3.1,-5 -2.9,-5 -2.75,-4.85 -2.75,-4.75 -2.75,-4.5 -2.75,-1 ; -1.25,-1 -1.25,-4.5 -1.25,-4.75 -1.25,-4.85 -1.1,-5 -0.9,-5 -0.75,-4.85 -0.75,-4.75 -0.75,-4.5 -0.75,-1 ; 0.75,-1 0.75,-4.5 0.75,-4.75 0.75,-4.85 0.9,-5 1.1,-5 1.25,-4.85 1.25,-4.75 1.25,-4.5 1.25,-1 ; 2.75,-1 2.75,-4.5 2.75,-4.75 2.75,-4.85 2.9,-5 3.1,-5 3.25,-4.85 3.25,-4.75 3.25,-4.5 3.25,-1 ; 4.75,-1 4.75,-4.5 4.75,-4.75 4.75,-4.85 4.9,-5 5.1,-5 5.25,-4.85 5.25,-4.75 5.25,-4.5 5.25,-1 ; 6.75,-1 6.75,-4.5 6.75,-4.75 6.75,-4.85 6.9,-5 7.1,-5 7.25,-4.85 7.25,-4.75 7.25,-4.5 7.25,-1 ; 8.75,-1 8.75,-4.5 8.75,-4.75 8.75,-4.85 8.9,-5 9.1,-5 9.25,-4.85 9.25,-4.75 9.25,-4.5 9.25,-1 ; -10,-1 10,-1 10,1 -10,1 -10,-1
Mechanical 15:
  lines w0.05: -0.5,0 0.5,0 ; 0,-0.5 0,0.5 ; -10.4,-5.2 -10.4,7.585 10.4,7.585 10.4,-5.2 -10.4,-5.2
3D body "621320284521.stp": height 4.02, standoff -0.98, extent -10,-5 10,7.22

## 621324245821 [mm] "2.00 mm SMT Dual Pin Header Low Profile (Reel), 24p"
height 4.7
pads (24):
  rect 0.89x3 smd: 1(-11,-2.25) 2(-11,2.25) 3(-9,-2.25) 4(-9,2.25) 5(-7,-2.25) 6(-7,2.25) 7(-5,-2.25) 8(-5,2.25) 9(-3,-2.25) 10(-3,2.25) 11(-1,-2.25) 12(-1,2.25) 13(1,-2.25) 14(1,2.25) 15(3,-2.25) 16(3,2.25) 17(5,-2.25) 18(5,2.25) 19(7,-2.25) 20(7,2.25) 21(9,-2.25) 22(9,2.25) 23(11,-2.25) 24(11,2.25)
Top Overlay:
  lines w0.2: -11.75,-2.075 -12.2,-2.075 -12.2,2.075 -11.75,2.075 ; 11.75,-2.075 12.2,-2.075 12.2,2.075 11.75,2.075
  text "24" at 11.9,2.5 h1.02
  text "23" at 11.9,-3.5 h1.02
  text "1" at -12.2,-3.5 h1.02
  text "2" at -12.5,2.5 h1.02
Mechanical 13:
  lines w0.1: -11.25,-2 -11.25,-3.1 -10.75,-3.1 -10.75,-2 ; -11.25,2 -11.25,3.1 -10.75,3.1 -10.75,2 ; -9.25,-2 -9.25,-3.1 -8.75,-3.1 -8.75,-2 ; -9.25,2 -9.25,3.1 -8.75,3.1 -8.75,2 ; -7.25,-2 -7.25,-3.1 -6.75,-3.1 -6.75,-2 ; -7.25,2 -7.25,3.1 -6.75,3.1 -6.75,2 ; -5.25,-2 -5.25,-3.1 -4.75,-3.1 -4.75,-2 ; -5.25,2 -5.25,3.1 -4.75,3.1 -4.75,2 ; -3.25,-2 -3.25,-3.1 -2.75,-3.1 -2.75,-2 ; -3.25,2 -3.25,3.1 -2.75,3.1 -2.75,2 ; -1.25,-2 -1.25,-3.1 -0.75,-3.1 -0.75,-2 ; -1.25,2 -1.25,3.1 -0.75,3.1 -0.75,2 ; 0.75,-2 0.75,-3.1 1.25,-3.1 1.25,-2 ; 0.75,2 0.75,3.1 1.25,3.1 1.25,2 ; 2.75,-2 2.75,-3.1 3.25,-3.1 3.25,-2 ; 2.75,2 2.75,3.1 3.25,3.1 3.25,2 ; 4.75,-2 4.75,-3.1 5.25,-3.1 5.25,-2 ; 4.75,2 4.75,3.1 5.25,3.1 5.25,2 ; 6.75,-2 6.75,-3.1 7.25,-3.1 7.25,-2 ; 6.75,2 6.75,3.1 7.25,3.1 7.25,2 ; 8.75,-2 8.75,-3.1 9.25,-3.1 9.25,-2 ; 8.75,2 8.75,3.1 9.25,3.1 9.25,2 ; 10.75,-2 10.75,-3.1 11.25,-3.1 11.25,-2 ; 10.75,2 10.75,3.1 11.25,3.1 11.25,2 ; -12,-2 12,-2 12,2 -12,2 -12,-2
Mechanical 15:
  lines w0.05: -0.5,0 0.5,0 ; 0,-0.5 0,0.5 ; -12.4,-3.95 12.4,-3.95 12.4,3.95 -12.4,3.95 -12.4,-3.95
3D body "621324245821.stp": height 4.7, standoff 0, extent -12,-3.1 12,3.1